# Altium integrated library CRCW040210K0FHEDP.IntLib: 1 symbol
Pins are listed as number, name and electrical type; pins without a type are passive.

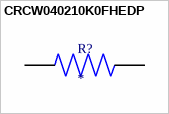
[diagram p0: symbol CRCW040210K0FHEDP]

## CRCW040210K0FHEDP
designator R?
MP: CRCW040210K0FHEDP; Package: None; Price: None; Value: *; Availability: Unavailable
footprint RESC1005X40N
pins: 1, 2